# Altium schematic symbol library Fuse.SchLib: 16 symbols
Pins are listed as number, name and electrical type; pins without a type are passive.

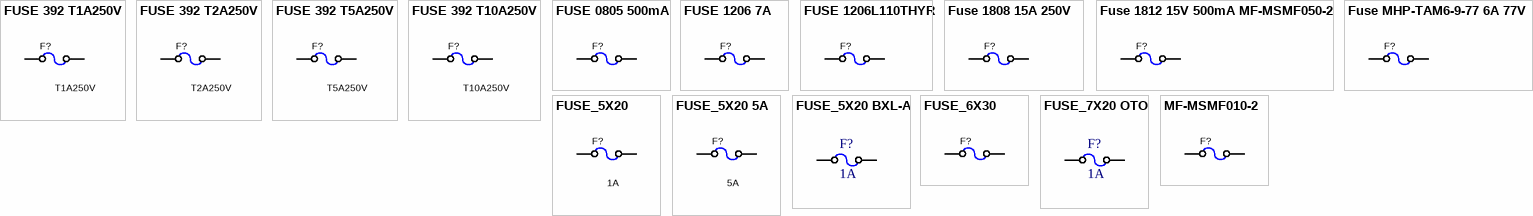
[diagram p0: symbols FUSE 392 T1A250V to MF-MSMF010-2]

## FUSE 392 T1A250V
designator F?, comment T1A250V
Code: 1609-006
footprint Fuse 392
pins: 1, 2

## FUSE 392 T2A250V
designator F?, comment T2A250V
Code: N/A
footprint Fuse 392
pins: 1, 2

## FUSE 392 T5A250V
designator F?, comment T5A250V
Code: 1609-002
footprint Fuse 392
pins: 1, 2

## FUSE 392 T10A250V
designator F?, comment T10A250V
Code: N/A
footprint Fuse 392
pins: 1, 2

## FUSE 0805 500mA
designator F?, comment 0805L050WR  (value not drawn)
0805L050WR 0805 6V 500mA; Code: N/A
footprint F0805 (FUSE FAST 500mA, 0805, 2012, 2.0X1.3mm)
pins: 1, 2

## FUSE 1206 7A
designator F?, comment 1206-7A  (value not drawn)
1206-7A 12V; Code: N/A
footprint F1206 (FUSE, 1206, 3.2x1.6mm)
pins: 1, 2

## FUSE 1206L110THYR
designator F?, comment 1206L110THYR  (value not drawn)
Fuses - PPTC PTC 8V 1206 1.1A POLYFUSE SMD THIN; Code: N/A; ComponentLink1Description: Datasheet; ComponentLink1URL: https://www.mouser.vn/datasheet/2/54/mf_msmf-772347.pdf
footprint F1812 (FUSE, 4.50x3.20mm)
footprint F1206 (FUSE, 1206, 3.2x1.6mm)
pins: 1, 2

## Fuse 1808 15A 250V
designator F?, comment 15A 250V  (value not drawn)
FUSE SMD 15A 250V 1808; Code: N/A; ComponentLink1Description: Datasheet; ComponentLink1URL: https://www.mouser.vn/datasheet/2/54/mf_msmf-772347.pdf
footprint F1808 (FUSE, 6.1 x 2.69 x 2.69 mm)
pins: 1, 2

## Fuse 1812 15V 500mA MF-MSMF050-2
designator F?, comment MF-MSMF050-2  (value not drawn)
MF-MSMF050-2 15V 0.5A 1812; Code: N/A; ComponentLink1Description: Datasheet; ComponentLink1URL: https://www.mouser.vn/datasheet/2/54/mf_msmf-772347.pdf
footprint F1812 (FUSE, 4.50x3.20mm)
pins: 1, 2

## Fuse MHP-TAM6-9-77 6A 77V
designator F?, comment 6A 77V  (value not drawn)
Fuse MHP-TAM6-9-77 6A 77V; Code: N/A; ComponentLink1Description: Datasheet; ComponentLink1URL: https://www.mouser.vn/datasheet/2/54/mf_msmf-772347.pdf
footprint MHP-TAM6-9-77 (FUSE, 11x3.8mm)
pins: 1, 2

## FUSE_5X20
designator F?, comment 1A
Fuse & HOLDER 5X20; Code: 1601-147; Code_sub1: 1601-01?; Value: 1A
footprint FUSE_5X20MM_4PIN (PCB Fuse Holder 5x20mm 4 PIN)
pins: 1, 2

## FUSE_5X20 5A
designator F?, comment 5A
Fuse & HOLDER 5X20; Code: 1601-147; Code_sub1: N/A; Value: 5A
footprint FUSE_5X20MM_4PIN (PCB Fuse Holder 5x20mm 4 PIN)
pins: 1, 2

## FUSE_5X20 BXL-A
designator F?, comment 1A
Fuse & holder 20x5 mm; Code: 1601-156; Code_sub1: 1601-10?; Value: 1A
footprint Fuse BLX-A 5x20mm
pins: 1, 2

## FUSE_6X30
designator F?, comment ?A  (value not drawn)
Fuse & HOLDER 6x30; Code: 1601-147; Code_sub1: 1601-0??; Value: ?A
footprint FUSE_6X32MM_4PIN (PCB Fuse Holder 6x32mm 2 PIN, pitch: 15.0mm  24x9mm)
pins: 1, 2

## FUSE_7X20 OTO
designator F?, comment 1A
Fuse & holder 20x7 mm; Code_sub1: 1601-10?; Code: N/A; Value: 1A
footprint Fuse OTO
pins: 1, 2

## MF-MSMF010-2
designator F?  (value not drawn)
Code: N/A
footprint F1812 (FUSE, 4.50x3.20mm)
pins: 1, 2